# Altium footprint library FootPrintLib_8.PcbLib: 590 footprints (part 11 of 37)
Each footprint in its own frame and in the unit in brackets; x right, y up, seen from the top. Pads: shape width x height; smd on the part's side, far side on the other; paste and mask are expansions set on the pad; w line width, h text height; cw(c..) or ccw(c..) is an arc to the next point about the centre after c.
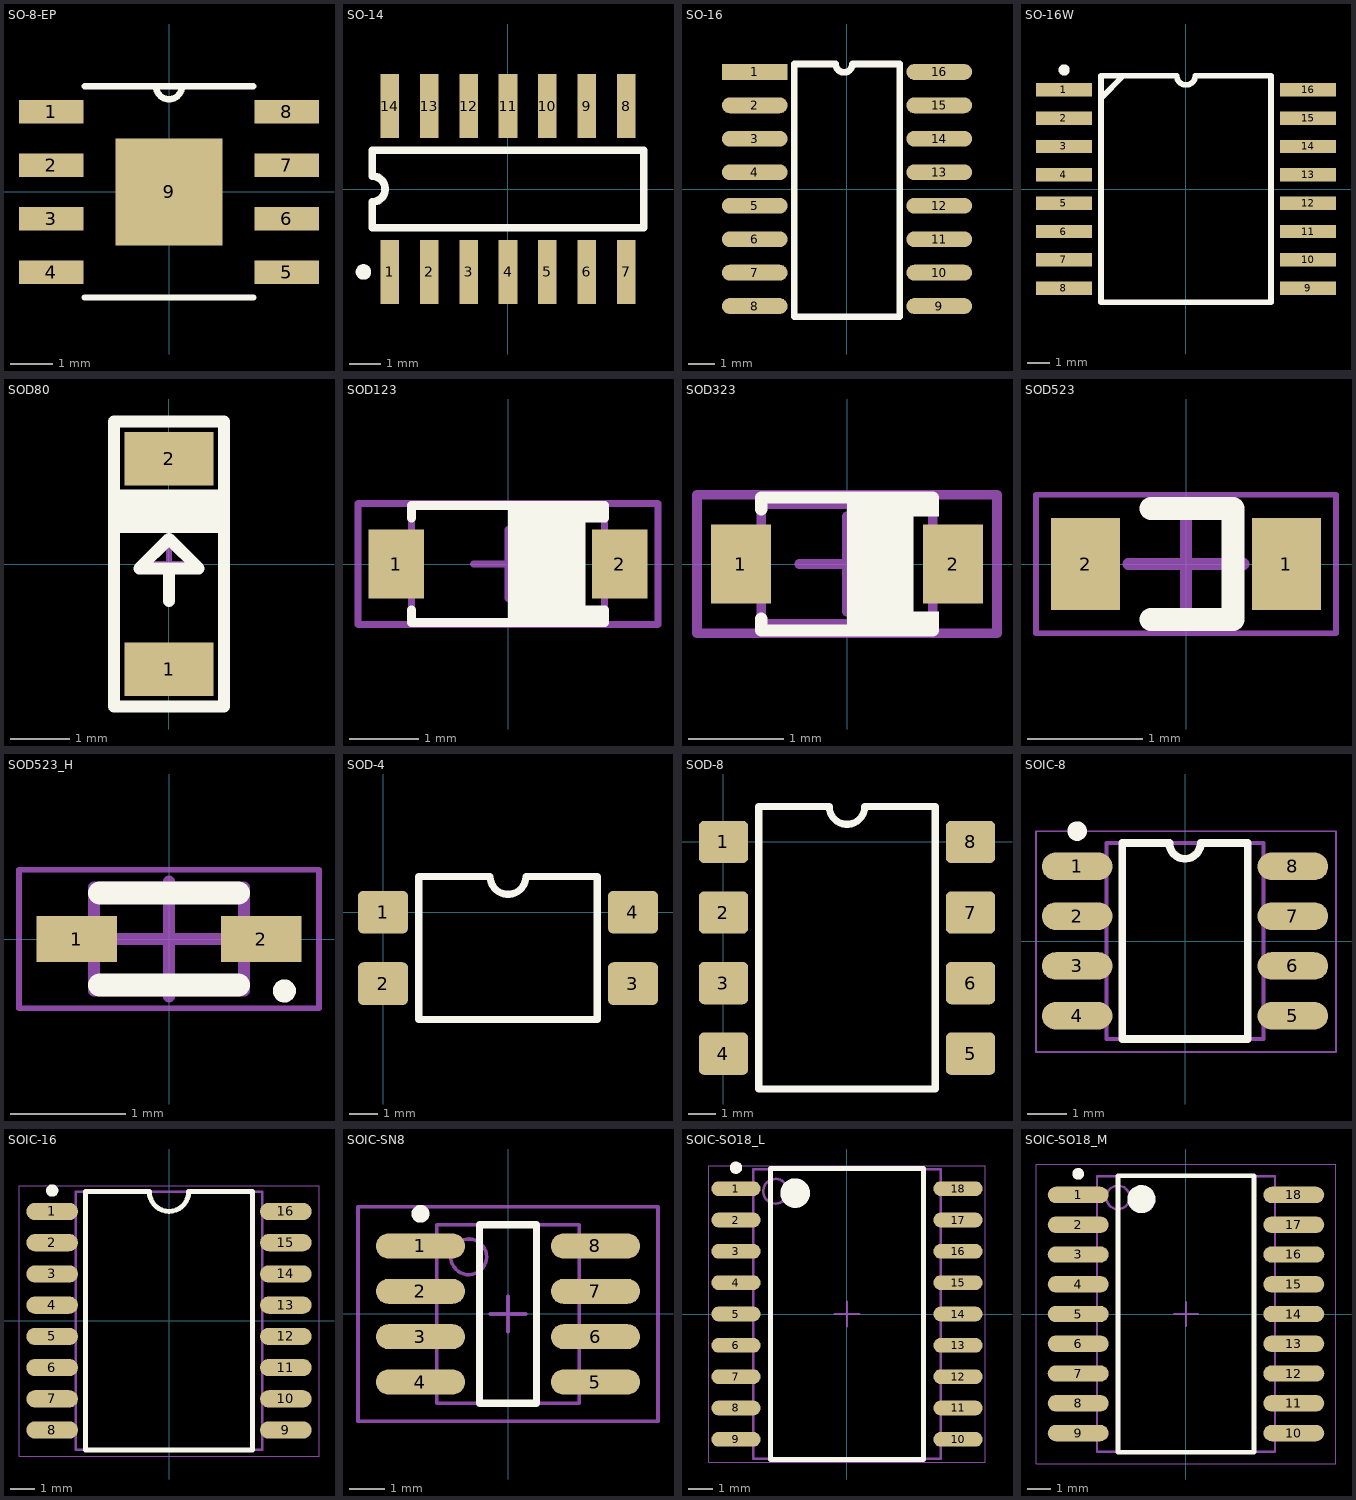
[diagram p10: the footprints below, top view; thin cyan lines are the x and y axes]

## SO-8-EP [mil]
pads (9):
  rect 60x22 smd: 1(-110,75) 2(-110,25) 3(-110,-25) 4(-110,-75) 5(110,-75) 6(110,-25) 7(110,25) 8(110,75)
  rect 100x100 smd: 9(0,0)
Top Overlay:
  lines w6: -78.5,-98.5 78.5,-98.5 ; -78.5,98.5 78.5,98.5 ; -12,98.5 ccw(c0,98.5) 12,98.5

## SO-14 [mm]
pads (14):
  rect 0.6x2.05 smd: 1(-3.799,-2.665) 2(-2.529,-2.665) 3(-1.259,-2.665) 4(0.011,-2.665) 5(1.281,-2.665) 6(2.551,-2.665) 7(3.821,-2.665) 8(3.821,2.685) 9(2.551,2.685) 10(1.281,2.685) 11(0.011,2.685) 12(-1.259,2.685) 13(-2.529,2.685) 14(-3.799,2.685)
Top Overlay:
  circle w0.25: c-4.649,-2.665 r0.125
  lines w0.254: -4.364,-1.24 4.386,-1.24 4.386,1.26 -4.364,1.26 -4.364,0.427 cw(c-4.364,0.01) -4.364,-0.406 -4.364,-1.24

## SO-16 [mm] "16-Lead Small Outline Integrated Circuit (SOIC), JEDEC MS-012, 0.150” Narrow"
height 1.75
pads (16):
  rect 2.5x0.6 smd: 1(-3.5,4.445)
  oval 2.5x0.6 smd: 2(-3.5,3.175) 3(-3.5,1.905) 4(-3.5,0.635) 5(-3.5,-0.635) 6(-3.5,-1.905) 7(-3.5,-3.175) 8(-3.5,-4.445) 9(3.5,-4.445) 10(3.5,-3.175) 11(3.5,-1.905) 12(3.5,-0.635) 13(3.5,0.635) 14(3.5,1.905) 15(3.5,3.175) 16(3.5,4.445)
Top Overlay:
  lines w0.254: -2,-4.855 -2,4.745 -0.43,4.745 ccw(c-0.112,4.745) 0.205,4.745 2,4.745 2,-4.855 -2,-4.855
3D body "SO-16.STEP": height 1.65, standoff 0, extent -3.04,-5 3.04,5

## SO-16W [mm] "100"
pads (16):
  rect 2.5x0.6 smd: 1(-5.469,4.445) 2(-5.469,3.175) 3(-5.469,1.905) 4(-5.469,0.635) 5(-5.469,-0.635) 6(-5.469,-1.905) 7(-5.469,-3.175) 8(-5.469,-4.445) 9(5.469,-4.445) 10(5.469,-3.175) 11(5.469,-1.905) 12(5.469,-0.635) 13(5.469,0.635) 14(5.469,1.905) 15(5.469,3.175) 16(5.469,4.445)
Top Overlay:
  circle w0.25: c-5.459,5.334 r0.125
  lines w0.254: -3.81,4.064 -2.794,5.08 ; -3.81,-5.08 -3.81,5.08 -0.417,5.08 ccw(c0,5.08) 0.417,5.08 3.81,5.08 3.81,-5.08 -3.81,-5.08

## SOD80 [mm]
pads (2):
  rect 1.5x0.9 smd: 1(0,-1.775) 2(0,1.775)
Top Overlay:
  region: -1.025,1.25 -1.025,0.525 1.025,0.525 1.025,1.25
  lines w0.2: 0,-0.625 0,-0.075 ; -0.925,-2.4 -0.925,2.4 0.925,2.4 0.925,-2.4 -0.925,-2.4 ; -0.5,-0.075 0,0.425 0.5,-0.075 -0.5,-0.075
Mechanical 1:
  lines w0.1: -0.225,0 0.225,0 ; 0,-0.225 0,0.225
3D body "User Library-SOD80-3.STEP": height 0.75, standoff -0.75, extent -0.8,-1.8 0.7,1.8

## SOD123 [mm] "SOD-123(1206) Package"
height 1.25
pads (2):
  rect 0.8x1 smd: 1(-1.62,0) 2(1.62,0)
Top Overlay:
  rectangle: 0,-0.8 1.425,-0.6
  rectangle: 0,0.6 1.425,0.8
  region: 0,0.85 0,-0.85 1.125,-0.85 1.125,0.85
  lines w0.127: -1.4,-0.663 -1.4,-0.85 1.4,-0.85 1.4,-0.663 ; -1.4,0.663 -1.4,0.85 1.4,0.85 1.4,0.663
Mechanical 13:
  lines w0.1: -1.4,-0.85 1.4,-0.85 1.4,0.85 -1.4,0.85 -1.4,-0.85
Mechanical 15:
  lines w0.1: -0.5,0 0.5,0 ; 0,-0.5 0,0.5 ; -2.175,-0.875 2.175,-0.875 2.175,0.875 -2.175,0.875 -2.175,-0.875
3D body "User Library-SOD123.step": height 1.35, standoff 0, extent -1.85,-0.775 1.85,0.775

## SOD323 [mm] "SOD-323(0805) Package"
height 1.15
pads (2):
  rect 0.63x0.83 smd: 1(-1.115,0) 2(1.115,0)
Top Overlay:
  rectangle: 0,-0.7 0.7,0.7
  rectangle: 0.413,0.5 0.964,0.7
  rectangle: 0.413,-0.7 0.964,-0.5
  lines w0.127: -0.9,-0.575 -0.9,-0.7 0.9,-0.7 0.9,-0.575 ; -0.9,0.575 -0.9,0.7 0.9,0.7 0.9,0.575
Mechanical 13:
  lines w0.1: -0.9,-0.625 -0.9,0.625 0.9,0.625 0.9,-0.625 -0.9,-0.625
Mechanical 15:
  lines w0.1: -0.5,0 0.5,0 ; 0,-0.5 0,0.5 ; -1.575,-0.725 1.575,-0.725 1.575,0.725 -1.575,0.725 -1.575,-0.725
3D body "User Library-SOD323.step": height 1.1, standoff 0, extent -1.35,-0.625 1.35,0.625

## SOD523 [mm] "SOD-523(0603) Package"
pads (2):
  rect 0.6x0.8 smd: 1(0.87,0) 2(-0.87,0)
Top Overlay:
  lines w0.2: -0.304,-0.483 0.406,-0.483 0.406,0.483 -0.304,0.483
Mechanical 15:
  lines w0.05: -1.3,-0.6 1.3,-0.6 1.3,0.6 -1.3,0.6 -1.3,-0.6
  lines w0.1: -0.5,0 0.5,0 ; 0,-0.5 0,0.5
3D body "User Library-SOD523-1.STEP": height 0.7, standoff 0, extent -0.8,-0.399 0.8,0.399

## SOD523_H [mm] "SOD523, 2-Leads, Body 0.80x1.60mm, IPC Medium Density"
height 0.7
pads (2):
  rect 0.7x0.4 smd: 1(-0.8,0) 2(0.8,0)
Top Overlay:
  circle w0.1: c1,-0.45 r0.05
  lines w0.2: -0.6,-0.4 0.6,-0.4 ; -0.6,0.4 0.6,0.4
Mechanical 13:
  lines w0.1: -0.65,-0.45 -0.65,0.45 0.65,0.45 0.65,-0.45 -0.65,-0.45
Mechanical 15:
  lines w0.05: -1.3,-0.6 -1.3,0.6 1.3,0.6 1.3,-0.6 -1.3,-0.6
  lines w0.1: -0.5,0 0.5,0 ; 0,-0.5 0,0.5
3D body "User Library-SOD523-1.STEP": height 0.7, standoff 0, extent -0.8,-0.399 0.8,0.399

## SOD-4 [mil]
pads (4):
  rrect25% 70x60 smd: 1(0,0) 2(0,-100) 3(350,-100) 4(350,0)
Top Overlay:
  lines w10: 50,-150 50,50 150,50 ccw(c175,50) 200,50 300,50 300,-150 50,-150

## SOD-8 [mil]
pads (8):
  rrect25% 70x60 smd: 1(0,0) 2(0,-100) 3(0,-200) 4(0,-300) 5(350,-300) 6(350,-200) 7(350,-100) 8(350,0)
Top Overlay:
  lines w10: 50,-350 300,-350 300,50 200,50 cw(c175,50) 150,50 50,50 50,-350

## SOIC-8 [mm] "SOIC, 8-Leads, Body 4/90x3/90mm, Pitch 1/27mm, IPC Medium Density"
height 1.75
pads (8):
  oval 1.8x0.7 smd: 1(-2.75,1.905) 2(-2.75,0.635) 3(-2.75,-0.635) 4(-2.75,-1.905) 5(2.75,-1.905) 6(2.75,-0.635) 7(2.75,0.635) 8(2.75,1.905)
Top Overlay:
  circle w0.25: c-2.75,2.805 r0.125
  lines w0.2: -1.6,-2.5 1.6,-2.5 1.6,2.5 0.4,2.5 cw(c0,2.499) -0.4,2.5 -1.6,2.5 -1.6,-2.5
Mechanical 13:
  lines w0.1: -2,-2.5 2,-2.5 2,2.5 -2,2.5 -2,-2.5
Mechanical 15:
  lines w0.05: -3.8,-2.825 3.85,-2.825 3.85,2.8 -3.8,2.8 -3.8,-2.825
3D body "SOIC127P610X175-8N.step": height 1.75, standoff 0, extent -3.05,-2.5 3.05,2.5

## SOIC-16 [mm] "SOIC, 16-Leads, Body 10/30x7/50mm, Pitch 1/27mm, IPC Medium Density"
height 2.65
pads (16):
  oval 2.1x0.7 smd: 1(-4.75,4.445) 2(-4.75,3.175) 3(-4.75,1.905) 4(-4.75,0.635) 5(-4.75,-0.635) 6(-4.75,-1.905) 7(-4.75,-3.175) 8(-4.75,-4.445) 9(4.75,-4.445) 10(4.75,-3.175) 11(4.75,-1.905) 12(4.75,-0.635) 13(4.75,0.635) 14(4.75,1.905) 15(4.75,3.175) 16(4.75,4.445)
Top Overlay:
  circle w0.25: c-4.75,5.295 r0.125
  lines w0.2: -3.4,-5.25 3.4,-5.25 3.4,5.25 0.8,5.25 cw(c0,5.25) -0.8,5.25 -3.4,5.25 -3.4,-5.25
Mechanical 13:
  lines w0.1: -3.8,-5.25 3.8,-5.25 3.8,5.25 -3.8,5.25 -3.8,-5.25
Mechanical 15:
  lines w0.05: -6.1,-5.5 6.1,-5.5 6.1,5.5 -6.1,5.5 -6.1,-5.5
3D body "SOIC127P1030X265-16N.step": height 2.65, standoff 0, extent -5.162,-5.25 5.162,5.25

## SOIC-SN8 [mm]
pads (8):
  oval 2.5x0.7 smd: 1(-2.45,1.905) 2(-2.45,0.635) 3(-2.45,-0.635) 4(-2.45,-1.905) 5(2.45,-1.905) 6(2.45,-0.635) 7(2.45,0.635) 8(2.45,1.905)
Top Overlay:
  circle w0.25: c-2.45,2.805 r0.125
  lines w0.2: -0.8,-2.5 -0.8,2.5 0.8,2.5 0.8,-2.5 -0.8,-2.5
Mechanical 13:
  circle w0.1: c-1.1,1.6 r0.5
  lines w0.1: -2,-2.5 -2,2.5 2,2.5 2,-2.5 -2,-2.5
Mechanical 15:
  lines w0.1: -0.5,0 0.5,0 ; 0,-0.5 0,0.5 ; -4.2,-3 -4.2,3 4.2,3 4.2,-3 -4.2,-3
3D body: height 1.75, standoff 0, extent -2,-2.5 2,2.5

## SOIC-SO18_L [mm] "SOIC, 18-Leads, Body 11.5x7.5mm, Pitch 1.27mm, IPC High Density"
height 2.65
pads (18):
  oval 2x0.6 smd: 1(-4.5,5.08) 2(-4.5,3.81) 3(-4.5,2.54) 4(-4.5,1.27) 5(-4.5,0) 6(-4.5,-1.27) 7(-4.5,-2.54) 8(-4.5,-3.81) 9(-4.5,-5.08) 10(4.5,-5.08) 11(4.5,-3.81) 12(4.5,-2.54) 13(4.5,-1.27) 14(4.5,0) 15(4.5,1.27) 16(4.5,2.54) 17(4.5,3.81) 18(4.5,5.08)
Top Overlay:
  circle w0.6: c-2.1,4.9 r0.3
  circle w0.25: c-4.5,5.93 r0.125
  lines w0.2: -3.1,-5.9 3.1,-5.9 3.1,5.9 -3.1,5.9 -3.1,-5.9
Mechanical 13:
  circle w0.1: c-2.9,4.975 r0.5
  lines w0.1: -3.8,-5.875 3.8,-5.875 3.8,5.875 -3.8,5.875 -3.8,-5.875
Mechanical 15:
  lines w0.05: -5.6,-6 5.6,-6 5.6,6 -5.6,6 -5.6,-6
  lines w0.1: -0.5,0 0.5,0 ; 0,-0.5 0,0.5
3D body: height 2.65, standoff 0.1, extent -3.8,-5.875 3.8,5.875

## SOIC-SO18_M [mm] "SOIC, 18-Leads, Body 11.5x7.5mm, Pitch 1.27mm, IPC Low Density"
height 2.65
pads (18):
  oval 2.6x0.7 smd: 1(-4.6,5.08) 2(-4.6,3.81) 3(-4.6,2.54) 4(-4.6,1.27) 5(-4.6,0) 6(-4.6,-1.27) 7(-4.6,-2.54) 8(-4.6,-3.81) 9(-4.6,-5.08) 10(4.6,-5.08) 11(4.6,-3.81) 12(4.6,-2.54) 13(4.6,-1.27) 14(4.6,0) 15(4.6,1.27) 16(4.6,2.54) 17(4.6,3.81) 18(4.6,5.08)
Top Overlay:
  circle w0.6: c-1.9,4.9 r0.3
  circle w0.25: c-4.6,5.98 r0.125
  lines w0.2: -2.9,-5.9 2.9,-5.9 2.9,5.9 -2.9,5.9 -2.9,-5.9
Mechanical 13:
  circle w0.1: c-2.9,4.975 r0.5
  lines w0.1: -3.8,-5.875 3.8,-5.875 3.8,5.875 -3.8,5.875 -3.8,-5.875
Mechanical 15:
  lines w0.05: -6.4,-6.4 6.4,-6.4 6.4,6.4 -6.4,6.4 -6.4,-6.4
  lines w0.1: -0.5,0 0.5,0 ; 0,-0.5 0,0.5
3D body: height 2.65, standoff 0.1, extent -3.8,-5.875 3.8,5.875